# EAGLE library part TPS79650DRBR (library TPS79650DRBR)
Ultralow-Noise, High PSRR, Fast, RF, 1-A Low-Dropout Linear Regulators Source: Datasheet <http://www.ti.com/lit/gpn/tps796>
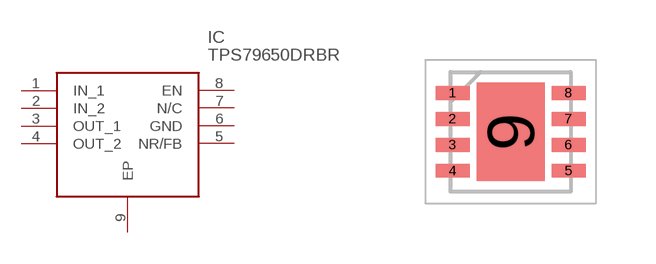
[diagram p0: symbol with the pads of SON65P300X300X100-9N; footprint SON65P300X300X100-9N]

Designator prefix IC

## TPS79650DRBR (Description: Ultralow-Noise, High PSRR, Fast, RF, 1-A Low-Dropout Linear Regulators; Height: 1mm; Manufacturer_Name: Texas Instruments; Manufacturer_Part_Number: TPS79650DRBR; Mouser_Part_Number: 595-TPS79650DRBR; Mouser_Price-Stock: https://www.mouser.co.uk/ProductDetail/Texas-Instruments/TPS79650DRBR?qs=7kv20MEVUlgJJlUqLWKaLg%3D%3D)  [SON65P300X300X100-9N]
1  IN_1
2  IN_2
3  OUT_1
4  OUT_2
5  NR/FB
6  GND
7  N/C  nc
8  EN
9  EP

## Footprint SON65P300X300X100-9N (pad centres in mm)
DRB0008B
smd 0.85 x 0.35: 1 -1.45,0.975; 2 -1.45,0.325; 3 -1.45,-0.325; 4 -1.45,-0.975; 5 1.45,-0.975; 6 1.45,-0.325; 7 1.45,0.325; 8 1.45,0.975
smd 1.7 x 2.45: 9 0,0